# Altium footprint library ACB_PcbLib.PcbLib: 167 footprints (part 8 of 11)
Each footprint in its own frame and in the unit in brackets; x right, y up, seen from the top. Pads: shape width x height; smd on the part's side, far side on the other; paste and mask are expansions set on the pad; w line width, h text height; cw(c..) or ccw(c..) is an arc to the next point about the centre after c.
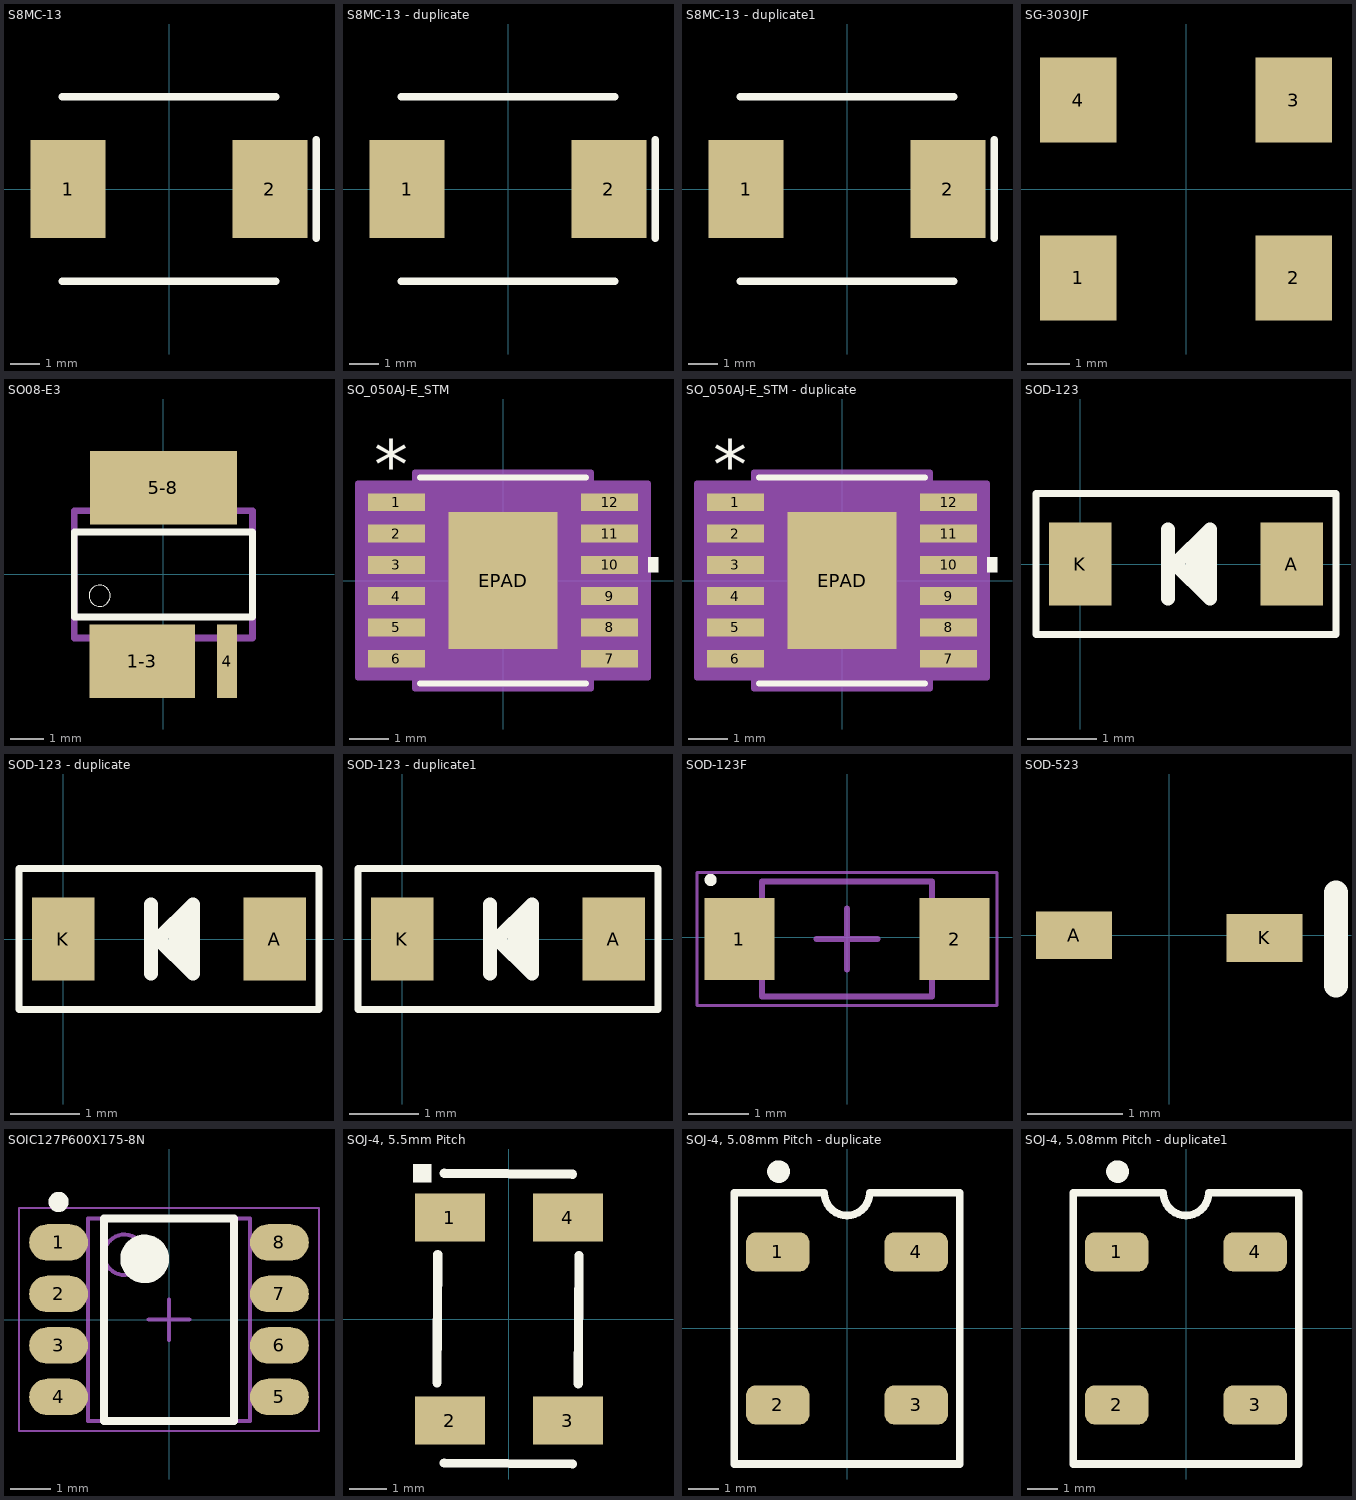
[diagram p7: the footprints below, top view; thin cyan lines are the x and y axes]

## S8MC-13 [mm]
pads (2):
  rect 2.54x3.302 smd: 1(-3.4,0) 2(3.4,0)
Top Overlay:
  lines w0.254: -3.6,-3.1 3.6,-3.1 ; -3.6,3.1 3.6,3.1 ; 4.953,-1.651 4.953,1.651

## S8MC-13 - duplicate [mm]
pads (2):
  rect 2.54x3.302 smd: 1(-3.4,0) 2(3.4,0)
Top Overlay:
  lines w0.254: -3.6,-3.1 3.6,-3.1 ; -3.6,3.1 3.6,3.1 ; 4.953,-1.651 4.953,1.651

## S8MC-13 - duplicate1 [mm]
pads (2):
  rect 2.54x3.302 smd: 1(-3.4,0) 2(3.4,0)
Top Overlay:
  lines w0.254: -3.6,-3.1 3.6,-3.1 ; -3.6,3.1 3.6,3.1 ; 4.953,-1.651 4.953,1.651

## SG-3030JF [mm]
pads (4):
  rect 1.8x2 smd: 1(-2.54,-2.1) 2(2.54,-2.1) 3(2.54,2.1) 4(-2.54,2.1)
3D body: height 1.5, standoff 0, extent -3.6,-2.3 3.6,2.3

## SO08-E3 [mm]
pads (3):
  rect 3.15x2.2 smd mask+0: 1-3(-0.635,-2.6)
  rect 0.6x2.2 smd: 4(1.905,-2.6)
  rect 4.4x2.2 smd mask+0: 5-8(0,2.6)
Top Overlay:
  circle w0: c-1.905,-0.635 r0.318
  lines w0.203: -2.667,-1.27 -2.667,1.27 2.667,1.27 2.667,-1.27 -2.667,-1.27
Top Solder:
  region: 2.3,1.4 1.5,1.4 1.5,3.8 2.3,3.8
  region: 1.05,1.4 0.25,1.4 0.25,3.8 1.05,3.8
  region: -0.25,1.402 -1.052,1.402 -1.052,3.8 -0.25,3.8
  region: -1.5,1.4 -2.301,1.4 -2.301,3.8 -1.5,3.8
  region: -1.5,-3.801 -2.301,-3.801 -2.301,-1.4 -1.5,-1.4
  region: -0.25,-3.803 -1.051,-3.803 -1.051,-1.4 -0.25,-1.4
  region: 1.05,-3.803 0.25,-3.803 0.25,-1.4 1.05,-1.4
Mechanical 13:
  region: -1.66,2.004 -2.154,2.004 -2.154,3.1 -1.66,3.1
  region: -0.39,2.004 -0.882,2.004 -0.882,3.1 -0.39,3.1
  region: 0.88,2.003 0.39,2.003 0.39,3.1 0.88,3.1
  region: 2.15,2.003 1.663,2.003 1.663,3.1 2.15,3.1
  region: 2.15,-3.103 1.662,-3.103 1.662,-2 2.15,-2
  region: 0.88,-3.101 0.39,-3.101 0.39,-2 0.88,-2
  region: -0.39,-3.105 -0.882,-3.105 -0.882,-2 -0.39,-2
  region: -1.66,-3.104 -2.153,-3.104 -2.153,-2 -1.66,-2
  lines w0.203: -2.667,-1.905 -2.667,1.905 2.667,1.905 2.667,-1.905 -2.667,-1.905

## SO_050AJ-E_STM [mil]
pads (13):
  rect 57.5x18 smd paste+0 mask+0: 1(-107.25,78.74) 2(-107.25,47.24) 3(-107.25,15.75) 4(-107.25,-15.75) 5(-107.25,-47.24) 6(-107.25,-78.74) 7(107.25,-78.74) 8(107.25,-47.24) 9(107.25,-15.75) 10(107.25,15.75) 11(107.25,47.24) 12(107.25,78.74)
  rect 110x138 smd paste-68.5 mask+0: EPAD(0,0)
Top Overlay:
  region: 146,23.25 156,23.25 156,8.25 146,8.25
  lines w6: -83.5,-103.5 83.5,-103.5 ; -83.5,103.5 83.5,103.5
  text "*" at -129.75,91.74 h50
Top Paste:
  region: 51.06,-3.94 3.94,-3.94 3.94,-65.06 51.06,-65.06
  region: 51.06,65.06 3.94,65.06 3.94,3.94 51.06,3.94
  region: -3.94,-3.94 -51.06,-3.94 -51.06,-65.06 -3.94,-65.06
  region: -3.94,65.06 -51.06,65.06 -51.06,3.94 -3.94,3.94
Mechanical 13:
  lines w0: -12,98.5 ccw(c0,98.5) 12,98.5
  lines w1: -122,-86.74 -78.5,-86.74 -78.5,-70.74 -122,-70.74 -122,-86.74 ; -122,-55.24 -78.5,-55.24 -78.5,-39.24 -122,-39.24 -122,-55.24 ; -122,-23.75 -78.5,-23.75 -78.5,-7.75 -122,-7.75 -122,-23.75 ; -122,7.75 -78.5,7.75 -78.5,23.75 -122,23.75 -122,7.75 ; -122,39.24 -78.5,39.24 -78.5,55.24 -122,55.24 -122,39.24 ; -122,70.74 -78.5,70.74 -78.5,86.74 -122,86.74 -122,70.74 ; -78.5,-98.5 -78.5,98.5 78.5,98.5 78.5,-98.5 -78.5,-98.5 ; 78.5,-86.74 122,-86.74 122,-70.74 78.5,-70.74 78.5,-86.74 ; 78.5,-55.24 122,-55.24 122,-39.24 78.5,-39.24 78.5,-55.24 ; 78.5,-23.75 122,-23.75 122,-7.75 78.5,-7.75 78.5,-23.75 ; 78.5,7.75 122,7.75 122,23.75 78.5,23.75 78.5,7.75 ; 78.5,39.24 122,39.24 122,55.24 78.5,55.24 78.5,39.24 ; 78.5,70.74 122,70.74 122,86.74 78.5,86.74 78.5,70.74
  text "*" at -76,45.5 h50
Mechanical 15:
  region: -88.5,-97.74 -146,-97.74 -146,97.74 -88.5,97.74 -88.5,108.5 88.5,108.5 88.5,97.74 146,97.74 146,-97.74 88.5,-97.74 88.5,-108.5 -88.5,-108.5
  lines w6: -146,-97.74 -88.5,-97.74 -88.5,-108.5 88.5,-108.5 88.5,-97.74 146,-97.74 146,97.74 88.5,97.74 88.5,108.5 -88.5,108.5 -88.5,97.74 -146,97.74 -146,-97.74
3D body "SO_050AJ-E_STM.step": height 64.09, standoff -2.01, extent -122.01,-98.5 122.01,98.5

## SO_050AJ-E_STM - duplicate [mil]
pads (13):
  rect 57.5x18 smd paste+0 mask+0: 1(-107.25,78.74) 2(-107.25,47.24) 3(-107.25,15.75) 4(-107.25,-15.75) 5(-107.25,-47.24) 6(-107.25,-78.74) 7(107.25,-78.74) 8(107.25,-47.24) 9(107.25,-15.75) 10(107.25,15.75) 11(107.25,47.24) 12(107.25,78.74)
  rect 110x138 smd paste-68.5 mask+0: EPAD(0,0)
Top Overlay:
  region: 146,23.25 156,23.25 156,8.25 146,8.25
  lines w6: -83.5,-103.5 83.5,-103.5 ; -83.5,103.5 83.5,103.5
  text "*" at -129.75,91.74 h50
Top Paste:
  region: -3.94,65.06 -51.06,65.06 -51.06,3.94 -3.94,3.94
  region: -3.94,-3.94 -51.06,-3.94 -51.06,-65.06 -3.94,-65.06
  region: 51.06,65.06 3.94,65.06 3.94,3.94 51.06,3.94
  region: 51.06,-3.94 3.94,-3.94 3.94,-65.06 51.06,-65.06
Mechanical 13:
  lines w0: -12,98.5 ccw(c0,98.5) 12,98.5
  lines w1: -122,-86.74 -122,-70.74 -78.5,-70.74 -78.5,-86.74 -122,-86.74 ; -122,-55.24 -122,-39.24 -78.5,-39.24 -78.5,-55.24 -122,-55.24 ; -122,-23.75 -122,-7.75 -78.5,-7.75 -78.5,-23.75 -122,-23.75 ; -122,7.75 -122,23.75 -78.5,23.75 -78.5,7.75 -122,7.75 ; -122,39.24 -122,55.24 -78.5,55.24 -78.5,39.24 -122,39.24 ; -122,70.74 -122,86.74 -78.5,86.74 -78.5,70.74 -122,70.74 ; -78.5,-98.5 78.5,-98.5 78.5,98.5 -78.5,98.5 -78.5,-98.5 ; 78.5,-86.74 78.5,-70.74 122,-70.74 122,-86.74 78.5,-86.74 ; 78.5,-55.24 78.5,-39.24 122,-39.24 122,-55.24 78.5,-55.24 ; 78.5,-23.75 78.5,-7.75 122,-7.75 122,-23.75 78.5,-23.75 ; 78.5,7.75 78.5,23.75 122,23.75 122,7.75 78.5,7.75 ; 78.5,39.24 78.5,55.24 122,55.24 122,39.24 78.5,39.24 ; 78.5,70.74 78.5,86.74 122,86.74 122,70.74 78.5,70.74
  text "*" at -76,45.5 h50
Mechanical 15:
  region: -88.5,-97.74 -146,-97.74 -146,97.74 -88.5,97.74 -88.5,108.5 88.5,108.5 88.5,97.74 146,97.74 146,-97.74 88.5,-97.74 88.5,-108.5 -88.5,-108.5
  lines w6: -146,-97.74 -146,97.74 -88.5,97.74 -88.5,108.5 88.5,108.5 88.5,97.74 146,97.74 146,-97.74 88.5,-97.74 88.5,-108.5 -88.5,-108.5 -88.5,-97.74 -146,-97.74
3D body "SO_050AJ-E_STM.step": height 64.09, standoff -2.01, extent -122.01,-98.5 122.01,98.5

## SOD-123 [mm]
pads (2):
  rect 0.9x1.2 smd: A(3.048,0) K(0,0)
Top Overlay:
  lines w0.102: -0.635,-1.016 -0.635,1.016 3.683,1.016 3.683,-1.016 -0.635,-1.016
  lines w0.2: 1.267,-0.5 1.267,0.5 ; 1.617,-0.15 1.617,0.15 ; 1.767,-0.3 1.767,0.3 ; 1.367,0 1.867,-0.5 1.867,0.5 1.367,0
3D body: height 0.7, standoff 0, extent 2.987,-0.225 3.112,0.275
3D body: height 0.7, standoff 0.5, extent 2.9,-0.225 3,0.275
3D body: height 0.2, standoff 0, extent 3.1,-0.225 3.3,0.275
3D body: height 0.76, standoff 0, extent 0.225,-0.875 2.9,0.875
3D body: height 0.2, standoff 0, extent -0.175,-0.25 0.025,0.25
3D body: height 0.7, standoff 0.5, extent 0.125,-0.25 0.225,0.25
3D body: height 0.7, standoff 0, extent 0.013,-0.25 0.138,0.25
3D body: height 0.79, standoff 0.74, extent 0.475,-0.75 0.6,0.75

## SOD-123 - duplicate [mm]
pads (2):
  rect 0.9x1.2 smd: A(3.048,0) K(0,0)
Top Overlay:
  lines w0.102: -0.635,-1.016 -0.635,1.016 3.683,1.016 3.683,-1.016 -0.635,-1.016
  lines w0.2: 1.267,-0.5 1.267,0.5 ; 1.617,-0.15 1.617,0.15 ; 1.767,-0.3 1.767,0.3 ; 1.367,0 1.867,-0.5 1.867,0.5 1.367,0
3D body: height 0.7, standoff 0, extent 2.987,-0.225 3.112,0.275
3D body: height 0.7, standoff 0.5, extent 2.9,-0.225 3,0.275
3D body: height 0.2, standoff 0, extent 3.1,-0.225 3.3,0.275
3D body: height 0.76, standoff 0, extent 0.225,-0.875 2.9,0.875
3D body: height 0.2, standoff 0, extent -0.175,-0.25 0.025,0.25
3D body: height 0.7, standoff 0.5, extent 0.125,-0.25 0.225,0.25
3D body: height 0.7, standoff 0, extent 0.013,-0.25 0.138,0.25
3D body: height 0.79, standoff 0.74, extent 0.475,-0.75 0.6,0.75

## SOD-123 - duplicate1 [mm]
pads (2):
  rect 0.9x1.2 smd: A(3.048,0) K(0,0)
Top Overlay:
  lines w0.102: -0.635,-1.016 3.683,-1.016 3.683,1.016 -0.635,1.016 -0.635,-1.016
  lines w0.2: 1.267,-0.5 1.267,0.5 ; 1.617,-0.15 1.617,0.15 ; 1.767,-0.3 1.767,0.3 ; 1.367,0 1.867,0.5 1.867,-0.5 1.367,0
3D body: height 0.79, standoff 0.74, extent 0.475,-0.75 0.6,0.75
3D body: height 0.7, standoff 0, extent 0.013,-0.25 0.138,0.25
3D body: height 0.7, standoff 0.5, extent 0.125,-0.25 0.225,0.25
3D body: height 0.2, standoff 0, extent -0.175,-0.25 0.025,0.25
3D body: height 0.76, standoff 0, extent 0.225,-0.875 2.9,0.875
3D body: height 0.2, standoff 0, extent 3.1,-0.225 3.3,0.275
3D body: height 0.7, standoff 0.5, extent 2.9,-0.225 3,0.275
3D body: height 0.7, standoff 0, extent 2.987,-0.225 3.112,0.275

## SOD-123F [mm]
pads (2):
  rect 1.15x1.35 smd: 1(-1.775,-0.027) 2(1.775,-0.027)
Top Overlay:
  circle w0.1: c-2.25,0.948 r0.05
Mechanical 13:
  lines w0.1: -1.4,-0.977 1.4,-0.977 1.4,0.923 -1.4,0.923 -1.4,-0.977
Mechanical 15:
  lines w0.05: -2.475,-1.127 2.475,-1.127 2.475,1.073 -2.475,1.073 -2.475,-1.127
  lines w0.1: -0.5,-0.027 0.5,-0.027 ; 0,-0.527 0,0.473
3D body: height 1.15, standoff 0, extent -1.4,-0.977 1.4,0.923

## SOD-523 [mm]
pads (2):
  rect 0.8x0.5 smd: A(-1,0) K(1,-0.027)
Top Overlay:
  lines w0.254: 1.75,-0.525 1.75,0.45
3D body: height 0.7, standoff 0, extent -1.15,-0.45 1.15,0.45

## SOIC127P600X175-8N [mm] "SOIC, 8-Leads, Body 4.90x3.90mm, Pitch 1.27mm, IPC Medium Density"
height 1.75
pads (8):
  oval 1.45x0.9 smd: 1(-2.725,1.905) 2(-2.725,0.635) 3(-2.725,-0.635) 4(-2.725,-1.905) 5(2.725,-1.905) 6(2.725,-0.635) 7(2.725,0.635) 8(2.725,1.905)
Top Overlay:
  circle w0.25: c-2.725,2.905 r0.125
  circle w0.6: c-0.6,1.5 r0.3
  lines w0.2: -1.6,-2.5 -1.6,2.5 1.6,2.5 1.6,-2.5 -1.6,-2.5
Mechanical 13:
  circle w0.1: c-1.1,1.6 r0.5
  lines w0.1: -2,-2.5 -2,2.5 2,2.5 2,-2.5 -2,-2.5
Mechanical 15:
  lines w0.05: -3.7,-2.75 -3.7,2.75 3.7,2.75 3.7,-2.75 -3.7,-2.75
  lines w0.1: -0.5,0 0.5,0 ; 0,-0.5 0,0.5
3D body: height 1.75, standoff 0.1, extent -2,-2.5 2,2.5

## SOJ-4, 5.5mm Pitch [mm]
pads (4):
  rect 1.9x1.3 smd: 1(-1.6,2.75) 2(-1.6,-2.75) 3(1.6,-2.75) 4(1.6,2.75)
Top Overlay:
  region: -2.6,4.2 -2.6,3.7 -2.1,3.7 -2.1,4.2
  lines w0.25: -1.95,-1.725 -1.925,1.75 ; -1.75,-3.9 1.725,-3.925 ; -1.75,3.95 1.725,3.925 ; 1.875,-1.75 1.9,1.725
3D body: height 2.5, standoff 0, extent -1.9,-4 1.9,4

## SOJ-4, 5.08mm Pitch - duplicate [mm]
pads (4):
  rrect50% 2.1x1.3 smd: 1(-2.314,2.54) 2(-2.314,-2.54) 3(2.286,-2.54) 4(2.286,2.54)
Top Overlay:
  circle w0.254: c-2.286,5.207 r0.25
  region: -2.54,5.461 -2.54,4.961 -2.04,4.961 -2.04,5.461
  lines w0.25: -0.764,4.5 -3.764,4.5 -3.764,-4.5 3.736,-4.5 3.736,4.5 0.736,4.5
  lines w0.254: -0.764,4.5 ccw(c-0.014,4.5) 0.736,4.5

## SOJ-4, 5.08mm Pitch - duplicate1 [mm]
pads (4):
  rrect50% 2.1x1.3 smd: 1(-2.314,2.54) 2(-2.314,-2.54) 3(2.286,-2.54) 4(2.286,2.54)
Top Overlay:
  circle w0.254: c-2.286,5.207 r0.25
  region: -2.54,5.461 -2.54,4.961 -2.04,4.961 -2.04,5.461
  lines w0.25: -0.764,4.5 -3.764,4.5 -3.764,-4.5 3.736,-4.5 3.736,4.5 0.736,4.5
  lines w0.254: -0.764,4.5 ccw(c-0.014,4.5) 0.736,4.5